# Altium footprint library PCB - CONNECTORS - MOLEX 39-28-1243.PCBLIB: 1 footprints
Each footprint in its own frame and in the unit in brackets; x right, y up, seen from the top. Pads: shape width x height; smd on the part's side, far side on the other; paste and mask are expansions set on the pad; w line width, h text height; cw(c..) or ccw(c..) is an arc to the next point about the centre after c.
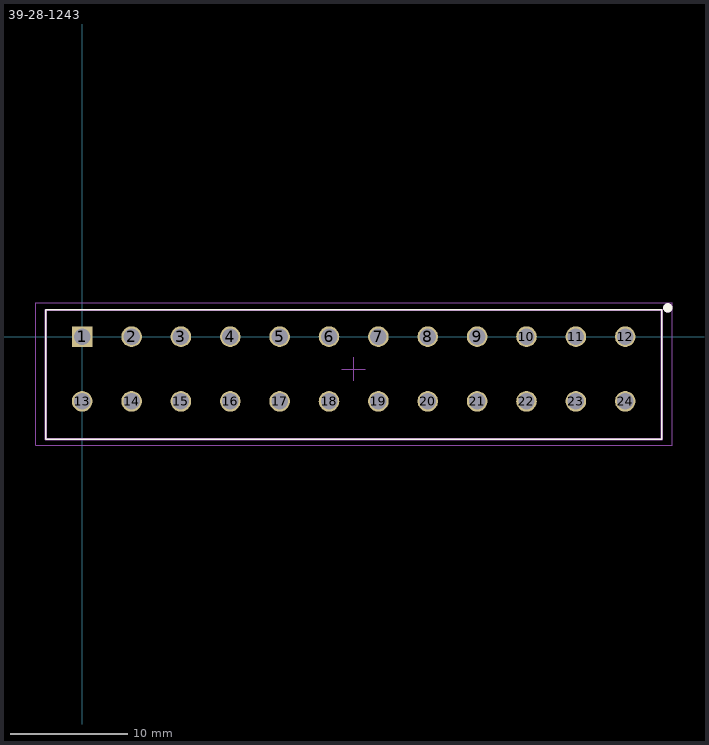
[diagram p0: the footprint, top view; thin cyan lines are the x and y axes]

## 39-28-1243 [mm]
pads (24):
  rect 1.75x1.75 hole 1.4: 1(0,0)
  round 1.75 hole 1.4: 2(4.2,0) 3(8.4,0) 4(12.6,0) 5(16.8,0) 6(21,0) 7(25.2,0) 8(29.4,0) 9(33.6,0) 10(37.8,0) 11(42,0) 12(46.2,0) 13(0,-5.5) 14(4.2,-5.5) 15(8.4,-5.5) 16(12.6,-5.5) 17(16.8,-5.5) 18(21,-5.5) 19(25.2,-5.5) 20(29.4,-5.5) 21(33.6,-5.5) 22(37.8,-5.5) 23(42,-5.5) 24(46.2,-5.5)
Top Overlay:
  circle w0.4: c49.825,2.45 r0.2
  lines w0.127: -3.1,-8.725 49.3,-8.725 49.3,2.275 -3.1,2.275 -3.1,-8.725
Top Assembly:
  circle w0.4: c49.825,2.45 r0.2
  lines w0.2: -3.1,-8.725 49.3,-8.725 49.3,2.275 -3.1,2.275 -3.1,-8.725
Top Courtyard:
  lines w0.05: -3.945,-9.245 -3.945,2.895 50.195,2.895 50.195,-9.245 -3.945,-9.245
Top Designator:
  text ".Designator" at 28.125,-10.175 h0.7
Top Component Center:
  lines w0.1: 22.1,-2.75 24.1,-2.75 ; 23.1,-3.75 23.1,-1.75
3D body "39-28-1243.stp": height 13.03, standoff -3.27, extent -3.119,-8.725 49.278,2.275